# Altium footprint library CL05A105KO5NNNC.PcbLib: 3 footprints
Each footprint in its own frame and in the unit in brackets; x right, y up, seen from the top. Pads: shape width x height; smd on the part's side, far side on the other; paste and mask are expansions set on the pad; w line width, h text height; cw(c..) or ccw(c..) is an arc to the next point about the centre after c.
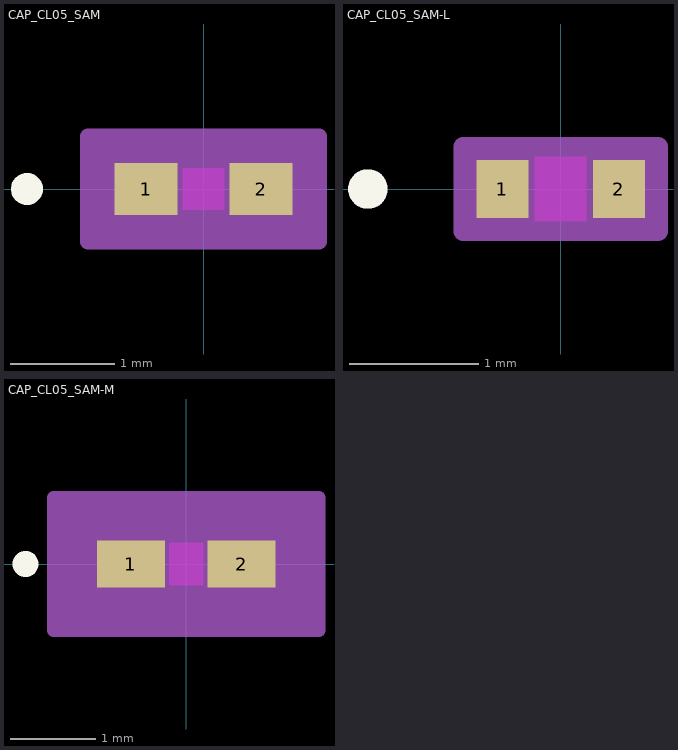
[diagram p0: the footprints below, top view; thin cyan lines are the x and y axes]

## CAP_CL05_SAM [mm]
pads (2):
  rect 0.6x0.5 smd paste+0 mask+0: 1(-0.55,0) 2(0.55,0)
Top Layer keep-out:
  region: -0.199,-0.199 -0.199,0.199 0.199,0.199 0.199,-0.199
Top Overlay:
  circle w0.152: c-1.688,0 r0.076
Mechanical 13:
  circle w0.025: c-0.423,0 r0.076
  lines w0.025: -0.5,-0.25 -0.5,0.25 ; -0.5,-0.25 0.5,-0.25 ; -0.5,-0.25 -0.25,-0.25 -0.25,0.25 -0.5,0.25 ; -0.5,-0.25 -0.5,0.25 ; -0.5,0.25 0.5,0.25 ; 0.5,-0.25 0.5,0.25 ; 0.5,-0.25 0.5,0.25 ; 0.5,-0.25 0.25,-0.25 0.25,0.25 0.5,0.25
Mechanical 15:
  region: 1.104,-0.504 -1.104,-0.504 -1.104,0.504 1.104,0.504
  lines w0.152: -1.104,-0.504 1.104,-0.504 1.104,0.504 -1.104,0.504 -1.104,-0.504
3D body "CAP_CL05_SAM.step": height 0.55, standoff 0, extent -0.5,-0.25 0.5,0.25

## CAP_CL05_SAM-L [mm]
pads (2):
  rect 0.4x0.45 smd paste+0 mask+0: 1(-0.45,0) 2(0.45,0)
Top Layer keep-out:
  region: -0.199,-0.199 -0.199,0.199 0.199,0.199 0.199,-0.199
Top Overlay:
  circle w0.152: c-1.488,0 r0.076
  text ".Designator" at -3.492,-0.635 h1.27
Keep-Out Layer:
  region: -0.199,-0.25 -0.199,0.25 0.199,0.25 0.199,-0.25
Mechanical 13:
  circle w0.025: c-0.323,0 r0.076
  lines w0.025: -0.5,-0.25 -0.5,0.25 ; -0.5,-0.25 -0.25,-0.25 -0.25,0.25 -0.5,0.25 ; -0.5,-0.25 0.5,-0.25 ; -0.5,-0.25 -0.5,0.25 ; -0.5,0.25 0.5,0.25 ; 0.5,-0.25 0.25,-0.25 0.25,0.25 0.5,0.25 ; 0.5,-0.25 0.5,0.25 ; 0.5,-0.25 0.5,0.25
  text ".Designator" at -3.492,-0.635 h1.27
Mechanical 15:
  region: 0.752,-0.327 -0.752,-0.327 -0.752,0.327 0.752,0.327
  lines w0.152: -0.752,-0.327 -0.752,0.327 0.752,0.327 0.752,-0.327 -0.752,-0.327
3D body "CAP_CL05_SAM.step": height 0.55, standoff 0, extent -0.5,-0.25 0.5,0.25

## CAP_CL05_SAM-M [mm]
pads (2):
  rect 0.8x0.55 smd paste+0 mask+0: 1(-0.65,0) 2(0.65,0)
Top Layer keep-out:
  region: -0.199,-0.199 -0.199,0.199 0.199,0.199 0.199,-0.199
Top Overlay:
  circle w0.152: c-1.888,0 r0.076
  text ".Designator" at -3.492,-0.635 h1.27
Keep-Out Layer:
  region: -0.199,-0.25 -0.199,0.25 0.199,0.25 0.199,-0.25
Mechanical 13:
  circle w0.025: c-0.523,0 r0.076
  lines w0.025: -0.5,-0.25 -0.5,0.25 ; -0.5,-0.25 -0.25,-0.25 -0.25,0.25 -0.5,0.25 ; -0.5,-0.25 0.5,-0.25 ; -0.5,-0.25 -0.5,0.25 ; -0.5,0.25 0.5,0.25 ; 0.5,-0.25 0.25,-0.25 0.25,0.25 0.5,0.25 ; 0.5,-0.25 0.5,0.25 ; 0.5,-0.25 0.5,0.25
  text ".Designator" at -3.492,-0.635 h1.27
Mechanical 15:
  region: 1.558,-0.783 -1.558,-0.783 -1.558,0.783 1.558,0.783
  lines w0.152: -1.558,-0.783 -1.558,0.783 1.558,0.783 1.558,-0.783 -1.558,-0.783
3D body "CAP_CL05_SAM.step": height 0.55, standoff 0, extent -0.5,-0.25 0.5,0.25